# Altium integrated library VIETTIEN.IntLib: 173 symbols (part 2 of 8)

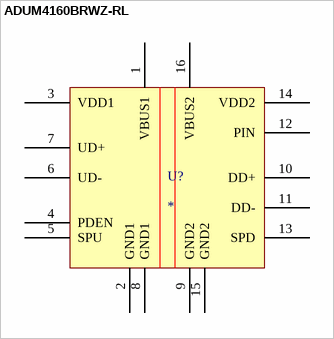
[diagram p23: symbol ADUM4160BRWZ-RL]

## ADUM4160BRWZ-RL
designator U?
ADUM4160BRWZ-RL
footprint SOIC127P1032X265-16N
pins: 1 VBUS1, 2 GND1, 3 VDD1, 4 PDEN, 5 SPU, 6 UD-, 7 UD+, 8 GND1, 9 GND2, 10 DD+, 11 DD-, 12 PIN, 13 SPD, 14 VDD2, 15 GND2, 16 VBUS2


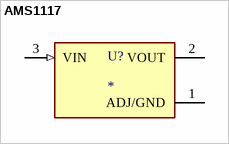
[diagram p24: symbol AMS1117]

## AMS1117
designator U?
1A LOW DROPOUT VOLTAGE REGULATOR SOT-223; MF: Advanced Monolithic Systems; MP: AMS1117; SnapEDA_Link: https://www.snapeda.com/parts/AMS1117/Advanced+Monolithic+Systems/view-part/?ref=snap; Package: SOT-223 Seeed Technology; Value: *; Check_prices: https://www.snapeda.com/parts/AMS1117/Advanced+Monolithic+Systems/view-part/?ref=eda
footprint SOT229P700X180-4N
pins: 1 ADJ/GND (power), 2 VOUT (power), 3 VIN (in)


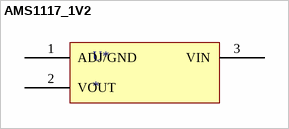
[diagram p25: symbol AMS1117_1V2]

## AMS1117_1V2
designator U*
AMS1117_1V2
footprint AMS1117_1V2
pins: 1 ADJ/GND, 2 VOUT, 3 VIN


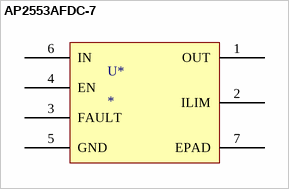
[diagram p26: symbol AP2553AFDC-7]

## AP2553AFDC-7
designator U*
AP2553AFDC-7
footprint AP2553AFDC-7
pins: 1 OUT, 2 ILIM, 3 FAULT, 4 EN, 5 GND, 6 IN, 7 EPAD


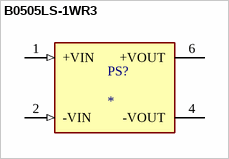
[diagram p27: symbol B0505LS-1WR3]

## B0505LS-1WR3
designator PS?
1W DC/DC-Converter 'ECONOLINE' SIP7 1kV unreg; MF: Recom Power; MP: RFB-0505S; SnapEDA_Link: https://www.snapeda.com/parts/RFB-0505S/Recom+Power/view-part/?ref=snap; Package: SIP-6 Recom Power; Value: *; Check_prices: https://www.snapeda.com/parts/RFB-0505S/Recom+Power/view-part/?ref=eda
footprint CONV_RFB-0505S
pins: 1 +VIN (in), 2 -VIN (in), 4 -VOUT, 6 +VOUT (power)


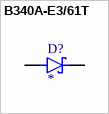
[diagram p28: symbol B340A-E3/61T]

## B340A-E3/61T
designator D?
Diode Schottky 40 V 3A Surface Mount DO-214AC (SMA); MF: Vishay Semiconductor; MP: B340A-E3/61T; SnapEDA_Link: https://www.snapeda.com/parts/B340A-E3/61T/Vishay/view-part/?ref=snap; Package: DO-214 Vishay Semiconductor; Value: *; Check_prices: https://www.snapeda.com/parts/B340A-E3/61T/Vishay/view-part/?ref=eda
footprint DIOM5126X229N
pins: A, C


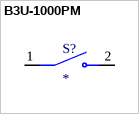
[diagram p29: symbol B3U-1000PM]

## B3U-1000PM
designator S?
Top, w/o Boss 1k Reel | Omron Electronic Components B3U-1000PM; SnapEDA_Link: https://www.snapeda.com/parts/B3U-1000PM/Omron/view-part/?ref=snap; Package: Custom Package Omron; Value: *; MF: Omron; MP: B3U-1000PM; Check_prices: https://www.snapeda.com/parts/B3U-1000PM/Omron/view-part/?ref=eda
footprint SW_B3U-1000PM
pins: 1, 2


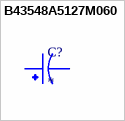
[diagram p30: symbol B43548A5127M060]

## B43548A5127M060
designator C?
120 ÂµF 450 V Aluminum Electrolytic Capacitors Radial, Can - Snap-In 680mOhm @ 100Hz 3000 Hrs @ 105Â°C  Ø25 × 30 mm  pitch 10 mm; MF: TDK Electronics; MP: B43548A5127M060; SnapEDA_Link: https://www.snapeda.com/parts/B43548A5127M060/TDK/view-part/?ref=snap; Package: None; Value: *; Check_prices: https://www.snapeda.com/parts/B43548A5127M060/TDK/view-part/?ref=eda
footprint CAP_B43548A5127M060
pins: 1, 2


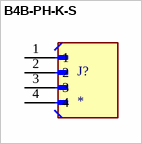
[diagram p31: symbol B4B-PH-K-S]

## B4B-PH-K-S
designator J?
MF: {'manufacturer': u'JST Sales America Inc.'}; MP: B4B-PH-K-S; Package: None; Price: None; Value: *; Availability: Unavailable
footprint JST_B4B-PH-K-S
pins: 1, 2, 3, 4


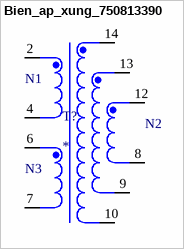
[diagram p32: symbol Bien_ap_xung_750813390]

## Bien_ap_xung_750813390
designator T?
TRANSFORMER FLYBACK LT3799 100UH 10%; Turns Ratio: 1: 1; Isolation Voltage: 4.5kV; Product Range: WE-FB 75081 Series; Inductance: 100ÂµH; DC Resistance: 0.15ohm; ET Constant: -; SVHC: No SVHC (15-Jan-2019); Output Voltage: 90V; MF: WÃ¼rth Elektronik; MP: 750813390; SnapEDA_Link: https://www.snapeda.com/parts/750813390/W%25C3%25BCrth+Elektronik+Midcom/view-part/?ref=snap; Package: None; Value: *; Check_prices: https://www.snapeda.com/parts/750813390/W%25C3%25BCrth+Elektronik+Midcom/view-part/?ref=eda
footprint WE-OLLT_ETD34_L39.6W43.18H30.48_PAD1.6
pins: 2, 4, 6, 7, 8, 9, 10, 12, 13, 14
text: N1; N2; N3


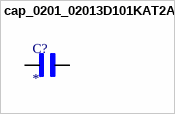
[diagram p33: symbol cap_0201_02013D101KAT2A]

## cap_0201_02013D101KAT2A
designator C?
cap 0201 (0603 Metric); MF: AVX; MP: 02013D101KAT2A; SnapEDA_Link: https://www.snapeda.com/parts/02013D101KAT2A/AVX/view-part/?ref=snap; Package: 0603 AVX; Value: *; Check_prices: https://www.snapeda.com/parts/02013D101KAT2A/AVX/view-part/?ref=eda
footprint CAPC0603X33N
pins: 1, 2


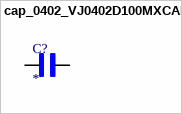
[diagram p34: symbol cap_0402_VJ0402D100MXCAP]

## cap_0402_VJ0402D100MXCAP
designator C?
cap 0402; MF: Vishay Vitramon; MP: VJ0402D100MXCAP; SnapEDA_Link: https://www.snapeda.com/parts/VJ0402D100MXCAP/Vishay/view-part/?ref=snap; Package: 1005 Vishay Vitramon; Value: *; Check_prices: https://www.snapeda.com/parts/VJ0402D100MXCAP/Vishay/view-part/?ref=eda
footprint CAPC1005X61N
pins: 1, 2


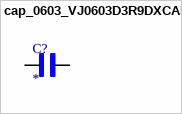
[diagram p35: symbol cap_0603_VJ0603D3R9DXCAP]

## cap_0603_VJ0603D3R9DXCAP
designator C?
cap 0603 (1608 Metric); MF: Vishay Vitramon; MP: VJ0603D3R9DXCAP; SnapEDA_Link: https://www.snapeda.com/parts/VJ0603D3R9DXCAP/Vishay/view-part/?ref=snap; Package: 1608 Vishay Vitramon; Value: *; Check_prices: https://www.snapeda.com/parts/VJ0603D3R9DXCAP/Vishay/view-part/?ref=eda
footprint CAPC1608X94N
pins: 1, 2


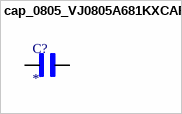
[diagram p36: symbol cap_0805_VJ0805A681KXCAP]

## cap_0805_VJ0805A681KXCAP
designator C?
CAP  0805; MF: Vishay Vitramon; MP: VJ0805A681KXCAP; SnapEDA_Link: https://www.snapeda.com/parts/VJ0805A681KXCAP/Vishay/view-part/?ref=snap; Package: 2012 Vishay Vitramon; Value: *; Check_prices: https://www.snapeda.com/parts/VJ0805A681KXCAP/Vishay/view-part/?ref=eda
footprint CAPC2012X145N
pins: 1, 2


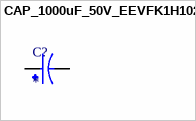
[diagram p37: symbol CAP_1000uF_50V_EEVFK1H102M]

## CAP_1000uF_50V_EEVFK1H102M
designator C?
1000ÂµF 50V Aluminum Electrolytic Capacitors Radial, Can - SMD 5000 Hrs @ 105Â°C; MF: Panasonic; MP: EEVFK1H102M; SnapEDA_Link: https://www.snapeda.com/parts/EEVFK1H102M/Panasonic/view-part/5787261/?ref=snap; Check_prices: https://www.snapeda.com/parts/EEVFK1H102M/Panasonic/view-part/5787261/?ref=eda; Digi-Key_Part_Number: PCE3477CT-ND; Package: RADIAL-2 Panasonic; Value: *
footprint CAP_EEVFK1H102M
pins: 1, 2


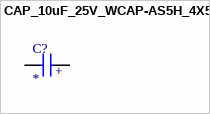
[diagram p38: symbol CAP_10uF_25V_WCAP-AS5H_4X5.5]

## CAP_10uF_25V_WCAP-AS5H_4X5.5
designator C?
CAP ALUM 10UF 20% 25V SMD; MF: WÃ¼rth Elektronik; MP: 865230440002; SnapEDA_Link: https://www.snapeda.com/parts/865230440002/W%25C3%25BCrth+Elektronik+Midcom/view-part/?ref=snap; Package: Radial WÃ¼rth Elektronik; Value: *; Check_prices: https://www.snapeda.com/parts/865230440002/W%25C3%25BCrth+Elektronik+Midcom/view-part/?ref=eda
footprint WCAP-AS5H_4X5.5(DXL)
pins: 1 POS, 2 NEG
text: +


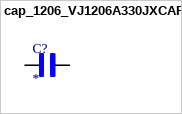
[diagram p39: symbol cap_1206_VJ1206A330JXCAP]

## cap_1206_VJ1206A330JXCAP
designator C?
cap 1206 (3216 Metric); MF: Vishay Vitramon; MP: VJ1206A330JXCAP; SnapEDA_Link: https://www.snapeda.com/parts/VJ1206A330JXCAP/Vishay/view-part/?ref=snap; Package: 3216 Vishay Vitramon; Value: *; Check_prices: https://www.snapeda.com/parts/VJ1206A330JXCAP/Vishay/view-part/?ref=eda
footprint CAPC3216X170N
pins: 1, 2


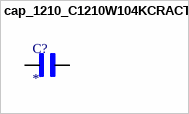
[diagram p40: symbol cap_1210_C1210W104KCRACTU]

## cap_1210_C1210W104KCRACTU
designator C?
Capacitor  1210; MF: KEMET; MP: C1210W104KCRACTU; SnapEDA_Link: https://www.snapeda.com/parts/C1210W104KCRACTU/Kemet/view-part/?ref=snap; Package: 1210 Yageo / Phycomp; Value: *; Check_prices: https://www.snapeda.com/parts/C1210W104KCRACTU/Kemet/view-part/?ref=eda
footprint CAPC3225X140N
pins: 1, 2


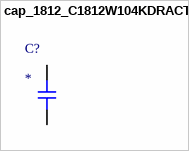
[diagram p41: symbol cap_1812_C1812W104KDRACTU]

## cap_1812_C1812W104KDRACTU
designator C?
Capacitor  1812; MF: Kemet; MP: C1812W104KDRACTU; SnapEDA_Link: https://www.snapeda.com/parts/C1812W104KDRACTU/Kemet/view-part/?ref=snap; Package: 4532 KEMET; Value: *; Check_prices: https://www.snapeda.com/parts/C1812W104KDRACTU/Kemet/view-part/?ref=eda
footprint CAPC4532X185N
pins: 1 A, 2 B


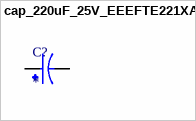
[diagram p42: symbol cap_220uF_25V_EEEFTE221XAL]

## cap_220uF_25V_EEEFTE221XAL
designator C?
CAP ALUM 220UF 20% 25V SMD; MF: Panasonic; MP: EEEFTE221XAL; SnapEDA_Link: https://www.snapeda.com/parts/EEEFTE221XAL/Panasonic/view-part/?ref=snap; Package: RADIAL-2 Panasonic; Value: *; Check_prices: https://www.snapeda.com/parts/EEEFTE221XAL/Panasonic/view-part/?ref=eda
footprint CAP_EEEFTE221XAL
pins: 1, 2


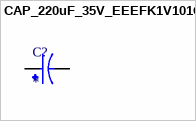
[diagram p43: symbol CAP_220uF_35V_EEEFK1V101GL]

## CAP_220uF_35V_EEEFK1V101GL
designator C?
CAP ALUM 100UF 20% 35V SMD; MF: Panasonic; MP: EEEFK1V101GL; SnapEDA_Link: https://www.snapeda.com/parts/EEEFK1V101GL/Panasonic/view-part/?ref=snap; Package: RADIAL-2 Panasonic; Value: *; Check_prices: https://www.snapeda.com/parts/EEEFK1V101GL/Panasonic/view-part/?ref=eda
footprint CAP_EEEFK1V101GL
pins: 1, 2


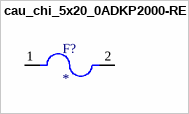
[diagram p44: symbol cau_chi_5x20_0ADKP2000-RE]

## cau_chi_5x20_0ADKP2000-RE
designator F?
Ceramic tube fuse | Axial Pigtail 5x20mm | UL | Slow Blow | 500mA | 600V; MP: 0ADKP2000-RE; Package: None; Price: None; Value: *; Availability: Unavailable
footprint FUSAD2722W65L2250D600
pins: 1, 2


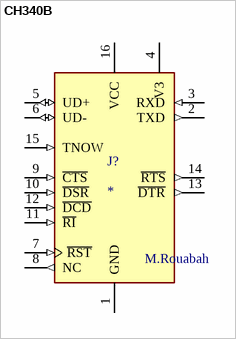
[diagram p45: symbol CH340B]

## CH340B
designator J?
MF: wch; MP: CH340B; SnapEDA_Link: https://www.snapeda.com/parts/CH340B/WCH/view-part/?ref=snap; Package: None; Value: *; Check_prices: https://www.snapeda.com/parts/CH340B/WCH/view-part/?ref=eda
footprint CH340B
pins: 1 GND (power), 2 TXD (out), 3 RXD (in), 4 V3 (power), 5 UD+ (io), 6 UD- (io), 7 ~{RST} (in), 8 NC (out), 9 ~{CTS} (in), 10 ~{DSR} (in), 11 ~{RI} (in), 12 ~{DCD} (in), 13 ~{DTR} (out), 14 ~{RTS} (out), 15 TNOW (in), 16 VCC (power)
text: M.Rouabah
